# Altium schematic symbol library 10144041-10011LF.SchLib: 1 symbol
Pins are listed as number, name and electrical type; pins without a type are passive.

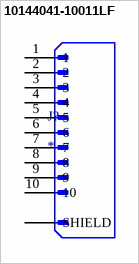
[diagram p0: symbol 10144041-10011LF]

## 10144041-10011LF
designator J?
MF: {'manufacturer': u'Amphenol ICC (FCI)'}; MP: 10144041-10011LF; Package: None; Price: None; Value: *; Availability: Unavailable
footprint AMPHENOL_10144041-10011LF
pins: 1, 2, 3, 4, 5, 6, 7, 8, 9, 10, S1 SHIELD, S2 SHIELD